# Altium footprint library 57478456.PcbLib: 1 footprints
Each footprint in its own frame and in the unit in brackets; x right, y up, seen from the top. Pads: shape width x height; smd on the part's side, far side on the other; paste and mask are expansions set on the pad; w line width, h text height; cw(c..) or ccw(c..) is an arc to the next point about the centre after c.
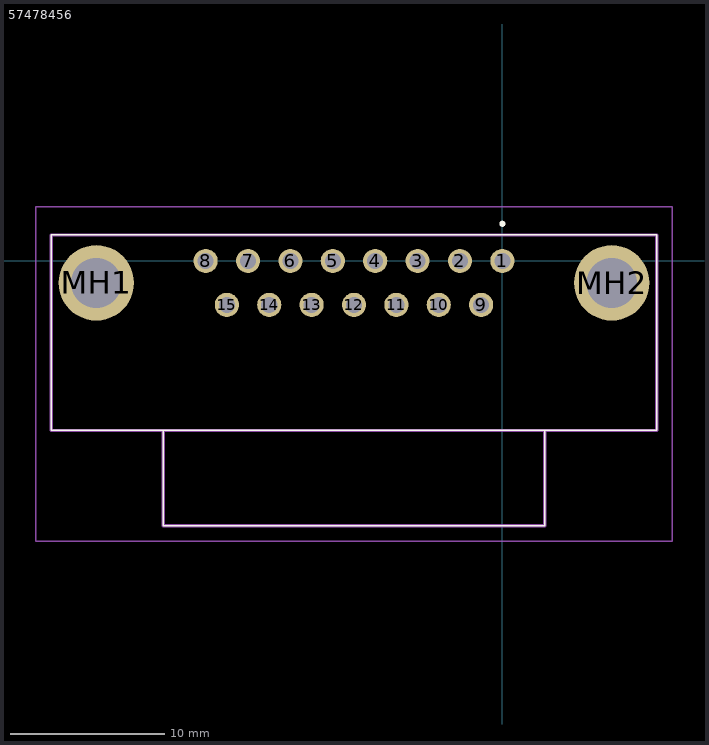
[diagram p0: the footprint, top view; thin cyan lines are the x and y axes]

## 57478456 [mm]
pads (17):
  round 1.56 hole 1.04: 1(0,0) 2(-2.74,0) 3(-5.48,0) 4(-8.22,0) 5(-10.96,0) 6(-13.7,0) 7(-16.44,0) 8(-19.18,0) 9(-1.37,-2.84) 10(-4.11,-2.84) 11(-6.85,-2.84) 12(-9.59,-2.84) 13(-12.33,-2.84) 14(-15.07,-2.84) 15(-17.81,-2.84)
  round 4.875 hole 3.25: MH1(-26.25,-1.42) MH2(7.07,-1.42)
Top Overlay:
  lines w0.1: -21.92,-10.95 -21.92,-17.12 2.74,-17.12 2.74,-10.95 ; -29.16,-10.95 9.98,-10.95 9.98,1.68 -29.16,1.68 -29.16,-10.95
  lines w0.2: 0,2.3 cw(c0,2.4) 0,2.5 ; 0,2.3 0,2.3 ; 0,2.3 ccw(c0,2.4) 0,2.5 ; 0,2.5 0,2.5
Mechanical 15:
  lines w0.2: -21.92,-10.95 -21.92,-17.12 2.74,-17.12 2.74,-10.95 ; -29.16,-10.95 9.98,-10.95 9.98,1.68 -29.16,1.68 -29.16,-10.95
Mechanical 20:
  lines w0.1: -30.16,-18.12 10.98,-18.12 10.98,3.5 -30.16,3.5 -30.16,-18.12